# Altium schematic symbol library Capacitor.SchLib: 735 symbols (part 2 of 20)
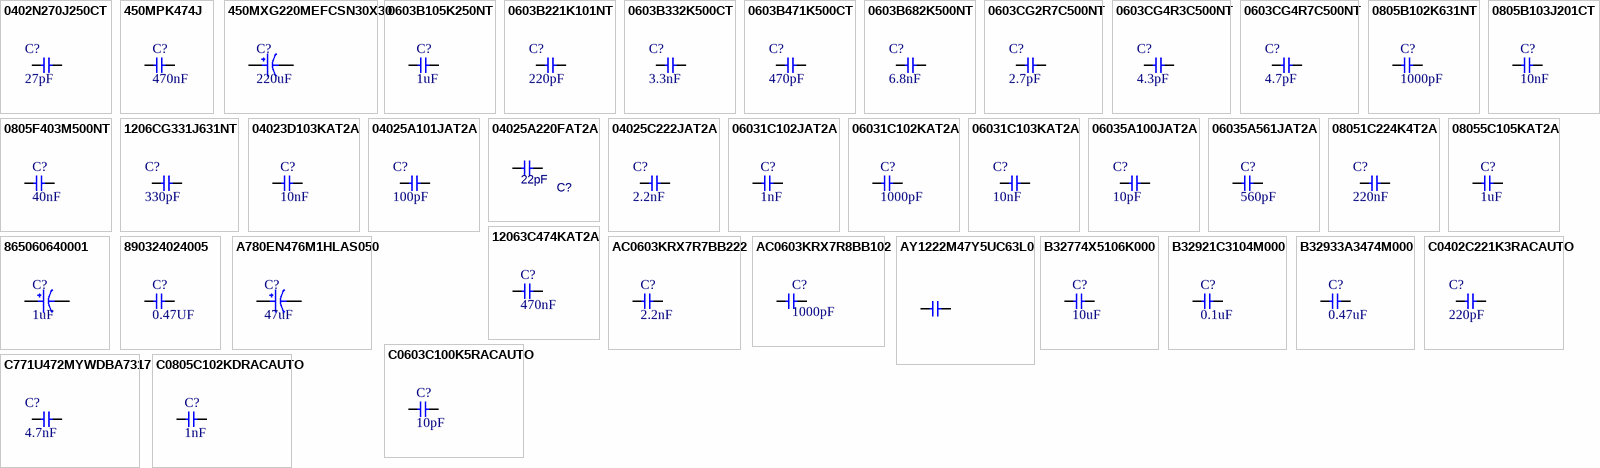
[diagram p19: symbols 0402N270J250CT to C0805C102KDRACAUTO]

## 04023D103KAT2A
designator C?, comment 10nF
CAP CER 10000PF 25V X5R 0402; Manufacturer: Kyocera AVX; Manufacturer Part Number: 04023D103KAT2A; Item Type: Capacitors; Supplier: Avnet; LCSC Part Number: C2167195; RoHS: Yes; Stock: 1210000; Pricing: 10000=0.03548, 20000=0.03795, 60000=0.03615 (USD); ComponentLink1URL: https://datasheet.ciiva.com/28673/759405-28673645.pdf?src-supplier=Element14; ComponentLink1Description: https://datasheet.ciiva.com/28673/759405-28673645.pdf?src-supplier=Element14; ComponentLink2URL: https://datasheet.ciiva.com/1123/1666675-1123349.pdf?src-supplier=Element14; ComponentLink2Description: https://datasheet.ciiva.com/1123/1666675-1123349.pdf?src-supplier=Element14; ComponentLink3URL: https://datasheet.ciiva.com/1123/1666675-1123350.pdf?src-supplier=Element14; ComponentLink3Description: https://datasheet.ciiva.com/1123/1666675-1123350.pdf?src-supplier=Element14; ComponentLink4URL: https://datasheet.ciiva.com/7709/1666675-7709529.pdf?src-supplier=Element14; ComponentLink4Description: https://datasheet.ciiva.com/7709/1666675-7709529.pdf?src-supplier=Element14; ComponentLink5URL: https://datasheet.ciiva.com/151/cx5r-151789.pdf?src-supplier=Digikey; ComponentLink5Description: https://datasheet.ciiva.com/151/cx5r-151789.pdf?src-supplier=Digikey; ComponentLink6URL: https://datasheet.ciiva.com/151/cx5r-151790.pdf?src-supplier=Digikey; ComponentLink6Description: https://datasheet.ciiva.com/151/cx5r-151790.pdf?src-supplier=Digikey; ComponentLink7URL: https://datasheet.ciiva.com/151/cx5r-151791.pdf?src-supplier=Digikey; ComponentLink7Description: https://datasheet.ciiva.com/151/cx5r-151791.pdf?src-supplier=Digikey; ComponentLink8URL: https://datasheet.ciiva.com/2987/cx5r-2987638.pdf?src-supplier=Avnet; ComponentLink8Description: https://datasheet.ciiva.com/2987/cx5r-2987638.pdf?src-supplier=Avnet; ComponentLink9URL: https://datasheet.ciiva.com/16395/cx5r-16395545.pdf?src-supplier=Future+Electronics; ComponentLink9Description: https://datasheet.ciiva.com/16395/cx5r-16395545.pdf?src-supplier=Future+Electronics
footprint Cap-0402
pins: 1, 2

## 04025A101JAT2A
designator C?, comment 100pF
CAP CER 100PF 50V C0G/NP0 0402; Manufacturer: Kyocera AVX; Manufacturer Part Number: 04025A101JAT2A; Tolerance: 5%; Dielectric: C0G; Insulation Resistance: 1GR; Temperature Coefficient: 30ppm/°C; Dissipation Factor: 2.5%; Item Type: Capacitor; Supplier 1: Avnet; RoHS: Yes; Category: Ceramic Capacitors; Stock 1: 3437500; Pricing 1: 10000=0.10788, 20000=0.10540, 40000=0.10292, 60000=0.10044, 80000=0.09796, 100000=0.09548, 1000000=0.09424 (USD); Mount: Surface Mount,PCB; Case/Package: 0402; Case Code (Metric): 1005; Case Code (Imperial): 0402; Contact Plating: Tin,Matte; Min Operating Temperature: -55°C; Max Operating Temperature: 125°C; Capacitance: 100pF; Voltage Rating (DC): 50V; Packaging: Tape and Reel; Voltage Rating: 50V; Package Quantity: 10000; Termination: SMD/SMT; Voltage: 50V; Series: -; Construction: Flat; Length: 1mm; Width: 0.004inch; Height: 0.56mm; Thickness: 0.013inch; Depth: 0.5mm; Radiation Hardening: No; Reach SVHC Compliant: Yes; Lead Free: Lead Free; RoHS Compliant: Yes; ComponentLink1URL: https://datasheet.ciiva.com/11786/0900766b80def0e2-11786618.pdf?src-supplier=RSComponents; ComponentLink1Description: https://datasheet.ciiva.com/11786/0900766b80def0e2-11786618.pdf?src-supplier=RSComponents; ComponentLink2URL: https://datasheet.ciiva.com/1123/493359-1123473.pdf?src-supplier=Element14; ComponentLink2Description: https://datasheet.ciiva.com/1123/493359-1123473.pdf?src-supplier=Element14; ComponentLink3URL: https://datasheet.ciiva.com/1123/493359-1123474.pdf?src-supplier=Element14; ComponentLink3Description: https://datasheet.ciiva.com/1123/493359-1123474.pdf?src-supplier=Element14; ComponentLink4URL: https://datasheet.ciiva.com/16332/ccog-16332501.pdf?src-supplier=Future+Electronics; ComponentLink4Description: https://datasheet.ciiva.com/16332/ccog-16332501.pdf?src-supplier=Future+Electronics; ComponentLink5URL: https://datasheet.ciiva.com/46392/759117-46392007.pdf?src-supplier=Element14; ComponentLink5Description: https://datasheet.ciiva.com/46392/759117-46392007.pdf?src-supplier=Element14; ComponentLink6URL: https://datasheet.ciiva.com/150/ccog-150473.pdf?src-supplier=Digi-Key; ComponentLink6Description: https://datasheet.ciiva.com/150/ccog-150473.pdf?src-supplier=Digi-Key; ComponentLink7URL: https://datasheet.ciiva.com/150/ccog-150474.pdf?src-supplier=Digi-Key; ComponentLink7Description: https://datasheet.ciiva.com/150/ccog-150474.pdf?src-supplier=Digi-Key; ComponentLink8URL: https://datasheet.ciiva.com/2987/ccog-2987642.pdf?src-supplier=Avnet; ComponentLink8Description: https://datasheet.ciiva.com/2987/ccog-2987642.pdf?src-supplier=Avnet; ComponentLink9URL: https://datasheet.ciiva.com/150/ccog-150475.pdf?src-supplier=Digi-Key; ComponentLink9Description: https://datasheet.ciiva.com/150/ccog-150475.pdf?src-supplier=Digi-Key; ComponentLink10URL: https://datasheet.ciiva.com/8083/ccog-8083054.pdf?src-supplier=Avnet; ComponentLink10Description: https://datasheet.ciiva.com/8083/ccog-8083054.pdf?src-supplier=Avnet; ComponentLink11URL: https://datasheet.ciiva.com/5413/ccog-5413647.pdf?src-supplier=Mouser; ComponentLink11Description: https://datasheet.ciiva.com/5413/ccog-5413647.pdf?src-supplier=Mouser; Supplier Part Number 1: 04025A101JAT2A; LCSC Part Number: C597014
footprint Cap-0402
pins: 1, 2

## 04025A220FAT2A
designator C?, comment 22pF
CAP CER 22PF 50V C0G/NP0 0402; Manufacturer: Kyocera AVX; Manufacturer Part Number: 04025A220FAT2A; Tolerance: 1%; Dielectric: C0G; Item Type: Capacitor; ComponentLink1URL: http://psearch.murata.com/capacitor/product/GCM219R71C105KA37%23.pdf; ComponentLink1Description: http://psearch.murata.com/capacitor/product/GCM219R71C105KA37%23.pdf; ComponentLink2URL: http://search.murata.co.jp/Ceramy/image/img/A01X/partnumbering_e_02.pdf; ComponentLink2Description: http://search.murata.co.jp/Ceramy/image/img/A01X/partnumbering_e_02.pdf; ComponentLink3URL: http://psearch.en.murata.com/capacitor/product/GCM219R71C105KA37%23.pdf; ComponentLink3Description: http://psearch.en.murata.com/capacitor/product/GCM219R71C105KA37%23.pdf; ComponentLink4URL: http://uk.rs-online.com/webdocs/0ef9/0900766b80ef92d0.pdf; ComponentLink4Description: http://uk.rs-online.com/webdocs/0ef9/0900766b80ef92d0.pdf; ComponentLink5URL: http://www.yageo.com/documents/recent/UPY-GP_NP0_16V-to-50V_16.pdf; ComponentLink5Description: http://www.yageo.com/documents/recent/UPY-GP_NP0_16V-to-50V_16.pdf; ComponentLink6URL: http://www.farnell.com/datasheets/1443161.pdf; ComponentLink6Description: http://www.farnell.com/datasheets/1443161.pdf; ComponentLink7URL: http://www.yageo.com/documents/recent/UPY-GP_NP0_16V-to-50V_8.pdf; ComponentLink7Description: http://www.yageo.com/documents/recent/UPY-GP_NP0_16V-to-50V_8.pdf; ComponentLink8URL: http://www.farnell.com/datasheets/1132289.pdf; ComponentLink8Description: http://www.farnell.com/datasheets/1132289.pdf; ComponentLink9URL: http://www.mouser.com/ds/2/447/Yageo_UPY-GP_NP0_16V-to-50V_9-358835.pdf; ComponentLink9Description: http://www.mouser.com/ds/2/447/Yageo_UPY-GP_NP0_16V-to-50V_9-358835.pdf; ComponentLink10URL: https://www.verical.com/server-webapp/html/getDatasheet?partID=370074; ComponentLink10Description: https://www.verical.com/server-webapp/html/getDatasheet?partID=370074; ComponentLink11URL: http://catalogs.avx.com/SurfaceMount.pdf; ComponentLink11Description: http://catalogs.avx.com/SurfaceMount.pdf; ComponentLink12URL: http://www.avxcorp.com/docs/Catalogs/ccog.pdf; ComponentLink12Description: http://www.avxcorp.com/docs/Catalogs/ccog.pdf; ComponentLink13URL: http://www.mouser.com/ds/2/40/C0GNP0-Dielectric-951274.pdf; ComponentLink13Description: http://www.mouser.com/ds/2/40/C0GNP0-Dielectric-951274.pdf; Supplier 1: Digi-Key; Stock 1: 100000; Pricing 1: 1=0.67, 10=0.472, 100=0.3105, 500=0.23, 1000=0.1955, 2500=0.184, 5000=0.1725 (USD); Mount: Surface Mount; Case/Package: 0402; Case Code (Metric): 1005; Case Code (Imperial): 0402; Contact Plating: Matte,Tin; Min Operating Temperature: -55°C; Max Operating Temperature: 125°C; Capacitance: 22pF; Packaging: Tape and Reel; Voltage Rating (DC): 50V; Voltage Rating: 50V; Package Quantity: 1; Termination: SMD/SMT; Length: 1mm; Height: 0.56mm; Depth: 0.5mm; Width: 0.02inch; Thickness: 0.022inch; Radiation Hardening: No; REACH SVHC: Unknown; Lead Free: Lead Free; Supplier Part Number 1: 478-5765-1-ND; LCSC Part Number: C597022
footprint Cap-0402
pins: 1, 2

## 04025C222JAT2A
designator C?, comment 2.2nF
CAP CER 2.2nF 50V X7R ±5% 0402 MLCC - SMD/SMT ROHS; Manufacturer: Kyocera AVX; Manufacturer Part Number: 04025C222JAT2A; Item Type: Capacitor; Package: 0402; LCSC Part Number: C597041; ComponentLink1Description: LCSC; ComponentLink1URL: https://www.lcsc.com/product-detail/Multilayer-Ceramic-Capacitors-MLCC-SMD-SMT_Kyocera-AVX-04025C222JAT2A_C597041.html
footprint Cap-0402
pins: 1, 2

## 06031C102JAT2A
designator C?, comment 1nF
CAP CER 1000PF 100V X7R 0603; Manufacturer: Kyocera AVX; Manufacturer Part Number: 06031C102JAT2A; Item Type: Capacitor; Material: 4241ConductorMaterial; Supplier: Future Electronics; LCSC Part Number: C2179225; RoHS: Yes; Stock: 32000; Pricing: 4000=0.0243, 12000=0.0234, 20000=0.023, 40000=0.0225, 80000=0.0216 (USD); Lead Free: 5697LeadFree; ComponentLink1URL: https://datasheet.ciiva.com/27056/2011951-27056177.pdf?src-supplier=Jameco; ComponentLink1Description: https://datasheet.ciiva.com/27056/2011951-27056177.pdf?src-supplier=Jameco; ComponentLink2URL: https://datasheet.ciiva.com/2987/cx7r-2987732.pdf?src-supplier=Avnet; ComponentLink2Description: https://datasheet.ciiva.com/2987/cx7r-2987732.pdf?src-supplier=Avnet; ComponentLink3URL: https://datasheet.ciiva.com/151/cx7r-151600.pdf?src-supplier=Digikey; ComponentLink3Description: https://datasheet.ciiva.com/151/cx7r-151600.pdf?src-supplier=Digikey; ComponentLink4URL: https://datasheet.ciiva.com/151/cx7r-151601.pdf?src-supplier=Digikey; ComponentLink4Description: https://datasheet.ciiva.com/151/cx7r-151601.pdf?src-supplier=Digikey; ComponentLink5URL: https://datasheet.ciiva.com/151/cx7r-151602.pdf?src-supplier=Digikey; ComponentLink5Description: https://datasheet.ciiva.com/151/cx7r-151602.pdf?src-supplier=Digikey; ComponentLink6URL: https://datasheet.ciiva.com/1124/1679506-1124194.pdf?src-supplier=Element14; ComponentLink6Description: https://datasheet.ciiva.com/1124/1679506-1124194.pdf?src-supplier=Element14; ComponentLink7URL: https://datasheet.ciiva.com/1124/1679506-1124195.pdf?src-supplier=Element14; ComponentLink7Description: https://datasheet.ciiva.com/1124/1679506-1124195.pdf?src-supplier=Element14; ComponentLink8URL: https://datasheet.ciiva.com/7855/1679506-7855032.pdf?src-supplier=Element14; ComponentLink8Description: https://datasheet.ciiva.com/7855/1679506-7855032.pdf?src-supplier=Element14; ComponentLink9URL: https://datasheet.ciiva.com/16286/cx7r-16286463.pdf?src-supplier=Future+Electronics; ComponentLink9Description: https://datasheet.ciiva.com/16286/cx7r-16286463.pdf?src-supplier=Future+Electronics
footprint Cap-0603
pins: 1, 2

## 06031C102KAT2A
designator C?, comment 1000pF
CAP CER 1000PF 100V X7R 0603; Manufacturer: Kyocera AVX; Manufacturer Part Number: 06031C102KAT2A; Item Type: Capacitor; Supplier: Avnet; LCSC Part Number: C2167292; RoHS: Yes; Stock: 656000; Pricing: 4000=0.0086, 8000=0.0084, 16000=0.0082, 24000=0.008, 32000=0.0079 (USD); Lead Free: 5697LeadFree; ComponentLink1URL: https://datasheet.ciiva.com/5422/cx7r-218113-5422905.pdf?src-supplier=Mouser; ComponentLink1Description: https://datasheet.ciiva.com/5422/cx7r-218113-5422905.pdf?src-supplier=Mouser; ComponentLink2URL: https://datasheet.ciiva.com/11499/cx7r-11499669.pdf?src-supplier=Avnet; ComponentLink2Description: https://datasheet.ciiva.com/11499/cx7r-11499669.pdf?src-supplier=Avnet; ComponentLink3URL: https://datasheet.ciiva.com/2987/cx7r-2987733.pdf?src-supplier=Avnet; ComponentLink3Description: https://datasheet.ciiva.com/2987/cx7r-2987733.pdf?src-supplier=Avnet; ComponentLink4URL: https://datasheet.ciiva.com/150/cx7r-150395.pdf?src-supplier=Digikey; ComponentLink4Description: https://datasheet.ciiva.com/150/cx7r-150395.pdf?src-supplier=Digikey; ComponentLink5URL: https://datasheet.ciiva.com/150/cx7r-150396.pdf?src-supplier=Digikey; ComponentLink5Description: https://datasheet.ciiva.com/150/cx7r-150396.pdf?src-supplier=Digikey; ComponentLink6URL: https://datasheet.ciiva.com/150/cx7r-150397.pdf?src-supplier=Digikey; ComponentLink6Description: https://datasheet.ciiva.com/150/cx7r-150397.pdf?src-supplier=Digikey; ComponentLink7URL: https://datasheet.ciiva.com/1124/1679506-1124198.pdf?src-supplier=Element14; ComponentLink7Description: https://datasheet.ciiva.com/1124/1679506-1124198.pdf?src-supplier=Element14; ComponentLink8URL: https://datasheet.ciiva.com/22693/1679506-22693579.pdf?src-supplier=Element14; ComponentLink8Description: https://datasheet.ciiva.com/22693/1679506-22693579.pdf?src-supplier=Element14; ComponentLink9URL: https://datasheet.ciiva.com/7855/1679506-7855033.pdf?src-supplier=Element14; ComponentLink9Description: https://datasheet.ciiva.com/7855/1679506-7855033.pdf?src-supplier=Element14; ComponentLink10URL: https://datasheet.ciiva.com/7855/84526-7855189.pdf?src-supplier=Element14; ComponentLink10Description: https://datasheet.ciiva.com/7855/84526-7855189.pdf?src-supplier=Element14; ComponentLink11URL: https://datasheet.ciiva.com/16289/cx7r-16289400.pdf?src-supplier=Future+Electronics; ComponentLink11Description: https://datasheet.ciiva.com/16289/cx7r-16289400.pdf?src-supplier=Future+Electronics; ComponentLink12URL: https://datasheet.ciiva.com/14594/70001075-14594623.pdf?src-supplier=Allied+Electronics; ComponentLink12Description: https://datasheet.ciiva.com/14594/70001075-14594623.pdf?src-supplier=Allied+Electronics; ComponentLink13URL: https://datasheet.ciiva.com/14600/70001075-14600988.pdf?src-supplier=Allied+Electronics; ComponentLink13Description: https://datasheet.ciiva.com/14600/70001075-14600988.pdf?src-supplier=Allied+Electronics
footprint Cap-0603
pins: 1, 2

## 06031C103KAT2A
designator C?, comment 10nF
CAP CER 10000PF 100V X7R 0603; Manufacturer: Kyocera AVX; Manufacturer Part Number: 06031C103KAT2A; Item Type: Capacitors; Material: 4241ConductorMaterial; Tolerance: 10%; Insulation Resistance: 100GR; Dissipation Factor: 2.5%; Supplier: Avnet; LCSC Part Number: C2167322; RoHS: Yes; Stock: 512000; Pricing: 4000=0.05033 (USD); Mounting Technology: Surface Mount,PCB; Case/Package: 0603; Pins: 2; Case Code (Metric): 1608; Case Code (Imperial): 0603; Min Operating Temperature: -55°C; Max Operating Temperature: 125°C; Value: 10nF; Dielectric: X7R; Packaging: Tape and Reel; Voltage Rating (DC): 100V; Voltage: 100V; Voltage Rating: 100V; Package Quantity: 4000; Termination: SMD/SMT; Series: -; Construction: Flat; Voltage Rating (AC): 100V; Length: 1.6mm; Width: 0.006inch; Height: 0.9mm; Depth: 0.81mm; Thickness: 0.034inch; Reach SVHC Compliant: No; Lead Free: Lead Free; RoHS Compliant: Yes; ComponentLink1URL: https://datasheet.ciiva.com/11788/0900766b80dc2409-11788544.pdf?src-supplier=Rs; ComponentLink1Description: https://datasheet.ciiva.com/11788/0900766b80dc2409-11788544.pdf?src-supplier=Rs; ComponentLink2URL: https://datasheet.ciiva.com/1124/1679506-1124248.pdf?src-supplier=Element14; ComponentLink2Description: https://datasheet.ciiva.com/1124/1679506-1124248.pdf?src-supplier=Element14; ComponentLink3URL: https://datasheet.ciiva.com/152/cx7r-152476.pdf?src-supplier=Digikey; ComponentLink3Description: https://datasheet.ciiva.com/152/cx7r-152476.pdf?src-supplier=Digikey; ComponentLink4URL: https://datasheet.ciiva.com/2987/cx7r-2987736.pdf?src-supplier=Avnet; ComponentLink4Description: https://datasheet.ciiva.com/2987/cx7r-2987736.pdf?src-supplier=Avnet; ComponentLink5URL: https://datasheet.ciiva.com/1124/1679506-1124247.pdf?src-supplier=Element14; ComponentLink5Description: https://datasheet.ciiva.com/1124/1679506-1124247.pdf?src-supplier=Element14; ComponentLink6URL: https://datasheet.ciiva.com/7855/1679506-7855035.pdf?src-supplier=Element14; ComponentLink6Description: https://datasheet.ciiva.com/7855/1679506-7855035.pdf?src-supplier=Element14; ComponentLink7URL: https://datasheet.ciiva.com/152/cx7r-152475.pdf?src-supplier=Digikey; ComponentLink7Description: https://datasheet.ciiva.com/152/cx7r-152475.pdf?src-supplier=Digikey; ComponentLink8URL: https://datasheet.ciiva.com/152/cx7r-152477.pdf?src-supplier=Digikey; ComponentLink8Description: https://datasheet.ciiva.com/152/cx7r-152477.pdf?src-supplier=Digikey; ComponentLink9URL: https://datasheet.ciiva.com/5411/cx7r-5411278.pdf?src-supplier=Mouser; ComponentLink9Description: https://datasheet.ciiva.com/5411/cx7r-5411278.pdf?src-supplier=Mouser; ComponentLink10URL: https://datasheet.ciiva.com/14590/70001075-14590198.pdf?src-supplier=Allied+Electronics; ComponentLink10Description: https://datasheet.ciiva.com/14590/70001075-14590198.pdf?src-supplier=Allied+Electronics
footprint Cap-0603
pins: 1, 2

## 06035A100JAT2A
designator C?, comment 10pF
CAP CER 10PF 50V C0G/NP0 0603; Manufacturer: Kyocera AVX; Manufacturer Part Number: 06035A100JAT2A/4K; Tolerance: 5%; Dielectric: C0G; Temperature Coefficient: 30ppm/°C; Insulation Resistance: 100GR; Item Type: Capacitor; Supplier 1: Digi-Key; Stock 1: 196463; Pricing 1: 1=0.1, 10=0.05, 50=0.0272, 100=0.0222, 500=0.01586, 1000=0.01246 (USD); Mount: Surface Mount; Case/Package: 0603; Number of Pins: 2; Min Operating Temperature: -55°C; Max Operating Temperature: 125°C; Capacitance: 10pF; Packaging: Cut Tape; Voltage Rating (DC): 50V; Voltage: 50V; Length: 1.6mm; Width: 810um; Height: 0.9mm; Depth: 0.81mm; Thickness: 864um; REACH SVHC: No SVHC; Lead Free: Lead Free; Supplier Part Number 1: 478-1163-1-ND; LCSC Part Number: C79547
footprint Cap-0603
pins: 1, 2

## 06035A561JAT2A
designator C?, comment 560pF
CAP CER 560PF 50V C0G/NP0 0603; Manufacturer: Kyocera AVX; Manufacturer Part Number: 06035A561JAT2A; Item Type: Capacitor; Supplier: Future Electronics; LCSC Part Number: C597173; RoHS: Yes; Stock: 180000; Pricing: 4000=0.0172, 16000=0.0165, 40000=0.0091, 60000=0.0158, 100000=0.0088, 120000=0.0155, 160000=0.0083, 300000=0.0148 (USD); ComponentLink1URL: https://datasheet.ciiva.com/27051/1032160-27051276.pdf?src-supplier=Jameco; ComponentLink1Description: https://datasheet.ciiva.com/27051/1032160-27051276.pdf?src-supplier=Jameco; ComponentLink2URL: https://datasheet.ciiva.com/16286/ccog-16286446.pdf?src-supplier=Future+Electronics; ComponentLink2Description: https://datasheet.ciiva.com/16286/ccog-16286446.pdf?src-supplier=Future+Electronics; ComponentLink3URL: https://datasheet.ciiva.com/150/ccog-150647.pdf?src-supplier=Digikey; ComponentLink3Description: https://datasheet.ciiva.com/150/ccog-150647.pdf?src-supplier=Digikey; ComponentLink4URL: https://datasheet.ciiva.com/150/ccog-150648.pdf?src-supplier=Digikey; ComponentLink4Description: https://datasheet.ciiva.com/150/ccog-150648.pdf?src-supplier=Digikey; ComponentLink5URL: https://datasheet.ciiva.com/150/ccog-150649.pdf?src-supplier=Digikey; ComponentLink5Description: https://datasheet.ciiva.com/150/ccog-150649.pdf?src-supplier=Digikey; ComponentLink6URL: https://datasheet.ciiva.com/2987/ccog-2987809.pdf?src-supplier=Avnet; ComponentLink6Description: https://datasheet.ciiva.com/2987/ccog-2987809.pdf?src-supplier=Avnet; ComponentLink7URL: https://datasheet.ciiva.com/2987/ccog-2987810.pdf?src-supplier=Avnet; ComponentLink7Description: https://datasheet.ciiva.com/2987/ccog-2987810.pdf?src-supplier=Avnet; ComponentLink8URL: https://datasheet.ciiva.com/5423/ccog-5423589.pdf?src-supplier=Mouser; ComponentLink8Description: https://datasheet.ciiva.com/5423/ccog-5423589.pdf?src-supplier=Mouser; ComponentLink9URL: https://datasheet.ciiva.com/14598/70001039-14598549.pdf?src-supplier=Allied+Electronics; ComponentLink9Description: https://datasheet.ciiva.com/14598/70001039-14598549.pdf?src-supplier=Allied+Electronics; ComponentLink10URL: https://datasheet.ciiva.com/1124/425357-1124836.pdf?src-supplier=Element14; ComponentLink10Description: https://datasheet.ciiva.com/1124/425357-1124836.pdf?src-supplier=Element14; ComponentLink11URL: https://datasheet.ciiva.com/1124/425357-1124837.pdf?src-supplier=Element14; ComponentLink11Description: https://datasheet.ciiva.com/1124/425357-1124837.pdf?src-supplier=Element14
footprint Cap-0603
pins: 1, 2

## 08051C224K4T2A
designator C?, comment 220nF
CAP CER 0.22UF 100V X7R 0805; Manufacturer: Kyocera AVX; Manufacturer Part Number: 08051C224K4T2A; Tolerance: 10%; Item Type: Capacitor; Supplier 1: Digi-Key; RoHS: Yes; Category: Ceramic Capacitors; Stock 1: 151; Pricing 1: 1=0.27000, 10=0.18500, 50=0.12320, 100=0.10470, 500=0.07392, 1000=0.06468 (USD); Mount: Surface Mount; Case/Package: 0805; Contact Plating: Tin; Min Operating Temperature: -55°C; Max Operating Temperature: 125°C; Termination: Wraparound; Capacitance: 220nF; Dielectric: X7R; Voltage Rating (DC): 100V; Length: 2.01mm; RoHS Compliant: Yes; ComponentLink1URL: http://datasheets.avx.com/AutoMLCC.pdf?src-supplier=Avnet+Asia; ComponentLink1Description: http://datasheets.avx.com/AutoMLCC.pdf?src-supplier=Avnet+Asia; Supplier Part Number 1: 478-13049-1-ND; LCSC Part Number: C2176107
footprint Cap-0805 (SMD 0805)
pins: 1, 2

## 08055C105KAT2A
designator C?, comment 1uF
CAP CER 1UF 50V X7R 0805; Manufacturer: Kyocera AVX; Manufacturer Part Number: 08055C105KAT2A; Item Type: Capacitors; Material: Ceramic; Tolerance: 10%; Supplier: Rs; LCSC Part Number: C2167382; RoHS: Yes; Stock: 6530; Pricing: 10=1.518, 50=1.406, 100=1.309, 250=1.137, 500=0.98 (DKK); Mounting Technology: Surface Mount; Case/Package: 0805; Case Code (Metric): 2012; Case Code (Imperial): 0805; Min Operating Temperature: -55°C; Max Operating Temperature: 125°C; Value: 1uF; Dielectric: X7R; Termination: SMD/SMT; Voltage: 50V; Packaging: Tape and Reel; Voltage Rating: 50V; Package Quantity: 1; Series: -; Length: 2.01mm; Width: 0.049inch; Depth: 1.25mm; Thickness: 0.037inch; Reach SVHC Compliant: No; Lead Free: Lead Free; RoHS Compliant: Yes; ComponentLink1URL: https://datasheet.ciiva.com/25613/0900766b810a29b7-25613127.pdf?src-supplier=Rs; ComponentLink1Description: https://datasheet.ciiva.com/25613/0900766b810a29b7-25613127.pdf?src-supplier=Rs; ComponentLink2URL: https://datasheet.ciiva.com/6268/cx7r-6268826.pdf?src-supplier=Digikey; ComponentLink2Description: https://datasheet.ciiva.com/6268/cx7r-6268826.pdf?src-supplier=Digikey; ComponentLink3URL: https://datasheet.ciiva.com/7812/cx7r-7812085.pdf?src-supplier=Element14; ComponentLink3Description: https://datasheet.ciiva.com/7812/cx7r-7812085.pdf?src-supplier=Element14; ComponentLink4URL: https://datasheet.ciiva.com/22706/1679506-22706999.pdf?src-supplier=Element14; ComponentLink4Description: https://datasheet.ciiva.com/22706/1679506-22706999.pdf?src-supplier=Element14; ComponentLink5URL: https://datasheet.ciiva.com/46385/1818074-46385893.pdf?src-supplier=Element14; ComponentLink5Description: https://datasheet.ciiva.com/46385/1818074-46385893.pdf?src-supplier=Element14; ComponentLink6URL: https://datasheet.ciiva.com/14887/cx7r-14887080.pdf?src-supplier=Digikey; ComponentLink6Description: https://datasheet.ciiva.com/14887/cx7r-14887080.pdf?src-supplier=Digikey; ComponentLink7URL: https://datasheet.ciiva.com/14887/cx7r-14887081.pdf?src-supplier=Digikey; ComponentLink7Description: https://datasheet.ciiva.com/14887/cx7r-14887081.pdf?src-supplier=Digikey
footprint Cap-0805 (SMD 0805)
pins: 1, 2

## 12063C474KAT2A
designator C?, comment 470nF
CAP CER 0.47UF 25V X7R 1206; Manufacturer: Kyocera AVX; Manufacturer Part Number: 12063C474KAT2A; Item Type: Capacitor; Supplier: Future Electronics; LCSC Part Number: C5128353; RoHS: Yes; Stock: 38000; Pricing: 2000=0.0614, 6000=0.0591, 10000=0.0566, 20000=0.0567, 40000=0.0554, 80000=0.053 (USD); ComponentLink1URL: https://datasheet.ciiva.com/11788/0900766b80dc2409-11788602.pdf?src-supplier=Rs; ComponentLink1Description: https://datasheet.ciiva.com/11788/0900766b80dc2409-11788602.pdf?src-supplier=Rs; ComponentLink2URL: https://datasheet.ciiva.com/19476/2014158-19476160.pdf?src-supplier=Jameco; ComponentLink2Description: https://datasheet.ciiva.com/19476/2014158-19476160.pdf?src-supplier=Jameco; ComponentLink3URL: https://datasheet.ciiva.com/14601/70001075-14601957.pdf?src-supplier=Allied+Electronics; ComponentLink3Description: https://datasheet.ciiva.com/14601/70001075-14601957.pdf?src-supplier=Allied+Electronics; ComponentLink4URL: https://datasheet.ciiva.com/28546/683218-28546839.pdf?src-supplier=Element14; ComponentLink4Description: https://datasheet.ciiva.com/28546/683218-28546839.pdf?src-supplier=Element14; ComponentLink5URL: https://datasheet.ciiva.com/7833/84526-7833365.pdf?src-supplier=Element14; ComponentLink5Description: https://datasheet.ciiva.com/7833/84526-7833365.pdf?src-supplier=Element14; ComponentLink6URL: https://datasheet.ciiva.com/16291/cx7r-16291039.pdf?src-supplier=Future+Electronics; ComponentLink6Description: https://datasheet.ciiva.com/16291/cx7r-16291039.pdf?src-supplier=Future+Electronics; ComponentLink7URL: https://datasheet.ciiva.com/152/cx7r-152592.pdf?src-supplier=Digikey; ComponentLink7Description: https://datasheet.ciiva.com/152/cx7r-152592.pdf?src-supplier=Digikey; ComponentLink8URL: https://datasheet.ciiva.com/152/cx7r-152593.pdf?src-supplier=Digikey; ComponentLink8Description: https://datasheet.ciiva.com/152/cx7r-152593.pdf?src-supplier=Digikey; ComponentLink9URL: https://datasheet.ciiva.com/152/cx7r-152594.pdf?src-supplier=Digikey; ComponentLink9Description: https://datasheet.ciiva.com/152/cx7r-152594.pdf?src-supplier=Digikey
footprint Cap-1206 (SMD 1206)
pins: 1, 2

## 865060640001
designator C?, comment 1uF
CAP ALUM 1UF 20% 50V SMD; Manufacturer: Wurth Electronics; Manufacturer Part Number: 865060640001; Item Type: Capacitor; Leakage Current: 3uA; Insulation Resistance: 16.6667MR; Supplier: Digikey; Supplier Part Number: 732-8541-1-ND; RoHS: Yes; Stock: 18299; Pricing: 1=0.17, 50=0.141, 100=0.123, 250=0.109, 500=0.095, 1000=0.091 (USD); Length: 5.5mm; ComponentLink1URL: http://www.farnell.com/datasheets/1880069.pdf?src-supplier=Farnell; ComponentLink1Description: http://www.farnell.com/datasheets/1880069.pdf?src-supplier=Farnell; ComponentLink2URL: http://www.farnell.com/datasheets/1880069.pdf?src-supplier=Newark; ComponentLink2Description: http://www.farnell.com/datasheets/1880069.pdf?src-supplier=Newark; ComponentLink3URL: https://katalog.we-online.de/pbs/datasheet/865060640001.pdf?src-supplier=Digikey; ComponentLink3Description: https://katalog.we-online.de/pbs/datasheet/865060640001.pdf?src-supplier=Digikey; ComponentLink4URL: http://katalog.we-online.de/pbs/datasheet/865060640001.pdf?src-supplier=Digikey; ComponentLink4Description: http://katalog.we-online.de/pbs/datasheet/865060640001.pdf?src-supplier=Digikey; ComponentLink5URL: http://www.farnell.com/datasheets/1880069.pdf?src-supplier=Element14; ComponentLink5Description: http://www.farnell.com/datasheets/1880069.pdf?src-supplier=Element14
footprint 865060640001
pins: 1, 2

## 890324024005
designator C?, comment 0.47UF
CAP FILM 0.47UF 10% 275VAC RAD; Manufacturer: Wurth Electronics; Manufacturer Part Number: 890324024005; Item Type: Capacitor; Supplier: Digikey; Supplier Part Number: 732-5890-ND; RoHS: Yes; Stock: 13537; Pricing: 1=0.75, 50=0.645, 100=0.574, 250=0.501, 500=0.454, 1000=0.418 (USD); ComponentLink1URL: http://www.farnell.com/datasheets/1867975.pdf?src-supplier=Farnell; ComponentLink1Description: http://www.farnell.com/datasheets/1867975.pdf?src-supplier=Farnell; ComponentLink2URL: http://www.farnell.com/datasheets/1867975.pdf?src-supplier=Element14; ComponentLink2Description: http://www.farnell.com/datasheets/1867975.pdf?src-supplier=Element14; ComponentLink3URL: https://katalog.we-online.de/pbs/datasheet/890324024005.pdf?src-supplier=Digikey; ComponentLink3Description: https://katalog.we-online.de/pbs/datasheet/890324024005.pdf?src-supplier=Digikey; ComponentLink4URL: http://www.farnell.com/datasheets/1867975.pdf?src-supplier=Newark; ComponentLink4Description: http://www.farnell.com/datasheets/1867975.pdf?src-supplier=Newark
footprint 890324024005
pins: 1, 2

## A780EN476M1HLAS050
designator C?, comment 47uF
CAP ALUM HYB 47UF 20% 50V SMD; Manufacturer: KEMET; Manufacturer Part Number: A780EN476M1HLAS050; Item Type: Capacitor; Supplier: Mouser; Supplier Part Number: 80-A780EN476M1HLAS50; RoHS: No; Category: Polymer Capacitors; Stock: 5998; Pricing: 1=0.67, 10=0.397, 50=0.397, 100=0.323, 1000=0.212, 10000=0.188 (USD)
footprint A780EN476M1HLAS050
pins: 1, 2

## AC0603KRX7R7BB222
designator C?, comment 2.2nF
CAP CER 2200PF 16V X7R 0603; Manufacturer: Yageo; Manufacturer Part Number: AC0603KRX7R7BB222; Item Type: Capacitor; Tolerance: 10%; Supplier: Digikey; LCSC Part Number: C726555; RoHS: Yes; Stock: 423; Pricing: 1=0.11, 10=0.077, 50=0.0444, 100=0.0345, 500=0.02594, 1000=0.02039 (USD); Mounting Technology: Surface Mount; Case/Package: 0603; Case Code (Imperial): 0603; Case Code (Metric): 1608; Min Operating Temperature: -55°C; Max Operating Temperature: 125°C; Packaging: Cut Tape; Value: 2.2nF; Voltage Rating: 16V; Series: AC; Ratings: AEC-Q200; RoHS Compliant: Yes; ComponentLink1URL: http://www.yageo.com/NewPortal/_en/search/productDocs.jsp?YageoPartNumber=AC0603KRX7R7BB222&src-supplier=Digikey; ComponentLink1Description: http://www.yageo.com/NewPortal/_en/search/productDocs.jsp?YageoPartNumber=AC0603KRX7R7BB222&src-supplier=Digikey
footprint Cap-0603
pins: 1, 2

## AC0603KRX7R8BB102
designator C?, comment 1000pF
CAP CER 1000PF 25V X7R 0603; Item Type: Capacitor; Value: 1nF; Tolerance: 10%; LCSC Part Number: C726558; ComponentLink1Description: LCSC; Supplier: Digi-Key; Supplier Part Number: 311-3110-1-ND; RoHS: Yes; Category: Ceramic Capacitors; Stock: 13949; Pricing: 1=0.1, 10=0.042, 50=0.024, 100=0.0186, 500=0.014, 1000=0.011 (USD); Mounting Technology: Surface Mount; Case/Package: 0603; Case Code (Imperial): 0603; Case Code (Metric): 1608; Min Operating Temperature: -55°C; Max Operating Temperature: 125°C; Packaging: Cut Tape; Voltage Rating: 25V; Series: AC; Ratings: AEC-Q200; RoHS Compliant: Yes; ComponentLink2URL: http://www.yageo.com/NewPortal/_en/search/productDocs.jsp?YageoPartNumber=AC0603KRX7R8BB102&src-supplier=Digi-Key; ComponentLink2Description: http://www.yageo.com/NewPortal/_en/search/productDocs.jsp?YageoPartNumber=AC0603KRX7R8BB102&src-supplier=Digi-Key
footprint Cap-0603
pins: 1, 2

## AY1222M47Y5UC63L0
designator C?, comment 2.2nF
CAP CER 2200PF 760VAC Y5U RADIAL; Item Type: Capacitor; LCSC Part Number: C1620433; ComponentLink1Description: LCSC; Supplier: Mouser; Supplier Part Number: 72-AY1222M47Y5UC63L0; RoHS: No; Category: Ceramic Capacitors; Stock: 23960; Pricing: 1=0.72, 10=0.395, 50=0.395, 100=0.326, 1000=0.216, 10000=0.19 (USD); ComponentLink2URL: http://www.farnell.com/datasheets/2719986.pdf?src-supplier=Farnell; ComponentLink2Description: http://www.farnell.com/datasheets/2719986.pdf?src-supplier=Farnell
footprint AY1222M47Y5UC63L0
pins: 1, 2

## B32774X5106K000
designator C?, comment 10uF
FILM CAP MKP DC FILTERING - 600V; Manufacturer: TDK; Manufacturer Part Number: B32774X5106K000; Item Type: Capacitor; Supplier: Digikey; Supplier Part Number: 495-B32774X5106K000-ND; RoHS: No; Pricing: 1=4.3, 10=2.896, 50=2.3266, 224=1.97978, 672=1.80198, 1120=1.77575 (USD)
footprint B32774X5106K000
pins: 1, 2

## B32921C3104M000
designator C?, comment 0.1uF
CAP FILM 0.1UF 20% 630VDC RADIAL; Manufacturer: TDK EPCOS; Manufacturer Part Number: B32921C3104M000; Item Type: Film Capacitors; Dielectric Material: Polypropylene; Value: 100nF; Voltage: 630V; Dielectric: PP; Voltage Rating (AC): 305V; Insulation Resistance: 100R; Dissipation Factor: 1%; Lead Diameter: 0.6mm; Lead Length: 6mm; Ratings: X2; Supplier: Rs; LCSC Part Number: C361368; RoHS: Yes; Stock: 6670; Pricing: 100=1.997, 250=1.855, 500=1.75, 1000=1.571 (DKK); Mounting Technology: Through Hole; Case/Package: Radial; Pins: 2NUMBER; Min Operating Temperature: -40°C; Max Operating Temperature: 110°C; Tolerance: 20%; Termination: PC Pins; Series: B32921; Voltage Rating (DC): 630V; Length: 13mm; Height: 12mm; Lead Pitch: 10mm; Depth: 6mm; Reach SVHC Compliant: No; RoHS Compliant: Yes; ComponentLink1URL: https://datasheet.ciiva.com/48779/1833206-48779695.pdf?src-supplier=Element14; ComponentLink1Description: https://datasheet.ciiva.com/48779/1833206-48779695.pdf?src-supplier=Element14
footprint B32921C3104M000
pins: 1, 2

## B32933A3474M000
designator C?, comment 0.47uF
CAP FILM 0.47UF 20% 305VAC RAD; Manufacturer: TDK EPCOS; Manufacturer Part Number: B32933A3474M000; Item Type: Capacitors; Dielectric Material: Polyester; Value: 470nF; Ratings: AEC-Q200,X2; Supplier: Digikey; Supplier Part Number: 495-75595-ND; RoHS: Yes; Stock: 1785; Pricing: 1=1.25, 10=0.938, 50=0.8558, 100=0.701, 510=0.55953, 1020=0.4937, 2550=0.46078, 5100=0.45713 (USD); Case/Package: Radial; Series: B32933; Termination: PC Pins; RoHS Compliant: Yes; ComponentLink1URL: https://en.tdk.eu/inf/20/20/ds/MKT_B32932_936.pdf?src-supplier=Digikey; ComponentLink1Description: https://en.tdk.eu/inf/20/20/ds/MKT_B32932_936.pdf?src-supplier=Digikey
footprint B32933A3474M000
pins: 1, 2

## C0402C221K3RACAUTO
designator C?, comment 220pF
Cap Cer 220PF 25V X7R 0402; Manufacturer: KEMET; Manufacturer Part Number: C0402C221K3RACAUTO; Supplier: Mouser; Supplier Part Number: 80-C0402C221K3RAUTO; RoHS: Yes; Category: Ceramic Capacitors; Stock: 7535; Pricing: 1=0.36, 10=0.251, 50=0.251, 100=0.15, 1000=0.095, 10000=0.077 (USD); RoHS Compliant: Yes
footprint Cap-0402
pins: 1, 2

## C0603C100K5RACAUTO
designator C?, comment 10pF
CAP CER 10PF 50V X7R 0603; Manufacturer: KEMET; Manufacturer Part Number: C0603C100K5RACAUTO; Item Type: Capacitor; Material: 4241ConductorMaterial; Temperature Coefficient: 30ppm/°C; Supplier: Mouser; LCSC Part Number: C2170082; RoHS: Yes; Stock: 11331; Pricing: 1=0.25, 10=0.116, 50=0.116, 100=0.07, 1000=0.061, 10000=0.047 (USD); Height: 870um; ComponentLink1URL: http://www.farnell.com/datasheets/2750555.pdf?src-supplier=Farnell; ComponentLink1Description: http://www.farnell.com/datasheets/2750555.pdf?src-supplier=Farnell; ComponentLink2URL: https://api.kemet.com/component-edge/download/datasheet/C0603C100K5RACAUTO.pdf?src-supplier=Digikey; ComponentLink2Description: https://api.kemet.com/component-edge/download/datasheet/C0603C100K5RACAUTO.pdf?src-supplier=Digikey; ComponentLink3URL: http://www.farnell.com/datasheets/2750555.pdf?src-supplier=Element14; ComponentLink3Description: http://www.farnell.com/datasheets/2750555.pdf?src-supplier=Element14; ComponentLink4URL: https://datasheet.octopart.com/C0603C100K5RACAUTO-KEMET-datasheet-86780146.pdf?src-supplier=Newark; ComponentLink4Description: https://datasheet.octopart.com/C0603C100K5RACAUTO-KEMET-datasheet-86780146.pdf?src-supplier=Newark; ComponentLink5URL: http://www.farnell.com/datasheets/2750555.pdf?src-supplier=Newark; ComponentLink5Description: http://www.farnell.com/datasheets/2750555.pdf?src-supplier=Newark; ComponentLink6URL: https://datasheet.octopart.com/C0603C100K5RACAUTO-KEMET-datasheet-140424581.pdf?src-supplier=TME; ComponentLink6Description: https://datasheet.octopart.com/C0603C100K5RACAUTO-KEMET-datasheet-140424581.pdf?src-supplier=TME
footprint Cap-0603
pins: 1, 2

## C771U472MYWDBA7317
designator C?, comment 4.7nF
CAP CER 4.7NF X1/Y2 400V/250V; Manufacturer: KEMET; Manufacturer Part Number: C771U472MYWDBA7317; Item Type: Capacitors; Supplier: Mouser; Supplier Part Number: 80-C771U472MYWDB7317; RoHS: Yes; Stock: 2909; Pricing: 1=0.96, 10=0.607, 50=0.607, 100=0.495, 1000=0.342, 10000=0.307 (USD); RoHS Compliant: Yes
footprint C771U472MYWDBA7317
pins: 1, 2

## C0805C102KDRACAUTO
designator C?, comment 1nF
CAP CER 0805 1NF 1000V X7R 10%; Manufacturer: KEMET; Manufacturer Part Number: C0805C102KDRACAUTO; Item Type: Capacitors; Dielectric Material: 4241ConductorMaterial; Voltage Rating: 1kV; Supplier: Mouser; Supplier Part Number: 80-C0805C102KDRAUTO; RoHS: Yes; Stock: 28337; Pricing: 1=0.38, 10=0.208, 50=0.208, 100=0.149, 1000=0.132, 10000=0.097 (USD); Case/Package: 0805; Min Operating Temperature: -55°C; Max Operating Temperature: 125°C; Value: 1nF; Packaging: Tape and Reel; Tolerance: 10%; Termination: SMD/SMT; Voltage Rating (DC): 1kV; RoHS Compliant: Yes; ComponentLink1URL: http://www.mouser.com/ds/2/212/KEM_C1010_X7R_HV_SMD-1102742.pdf?src-supplier=Mouser; ComponentLink1Description: http://www.mouser.com/ds/2/212/KEM_C1010_X7R_HV_SMD-1102742.pdf?src-supplier=Mouser; ComponentLink2URL: https://datasheet.octopart.com/C0805C102KDRACAUTO-KEMET-datasheet-149523722.pdf?src-supplier=Farnell; ComponentLink2Description: https://datasheet.octopart.com/C0805C102KDRACAUTO-KEMET-datasheet-149523722.pdf?src-supplier=Farnell; ComponentLink3URL: https://api.kemet.com/component-edge/download/datasheet/C0805C102KDRACAUTO.pdf?src-supplier=Digikey; ComponentLink3Description: https://api.kemet.com/component-edge/download/datasheet/C0805C102KDRACAUTO.pdf?src-supplier=Digikey; ComponentLink4URL: https://datasheet.octopart.com/C0805C102KDRACAUTO-KEMET-datasheet-112111960.pdf?src-supplier=Newark; ComponentLink4Description: https://datasheet.octopart.com/C0805C102KDRACAUTO-KEMET-datasheet-112111960.pdf?src-supplier=Newark
footprint Cap-0805 (SMD 0805)
pins: 1, 2

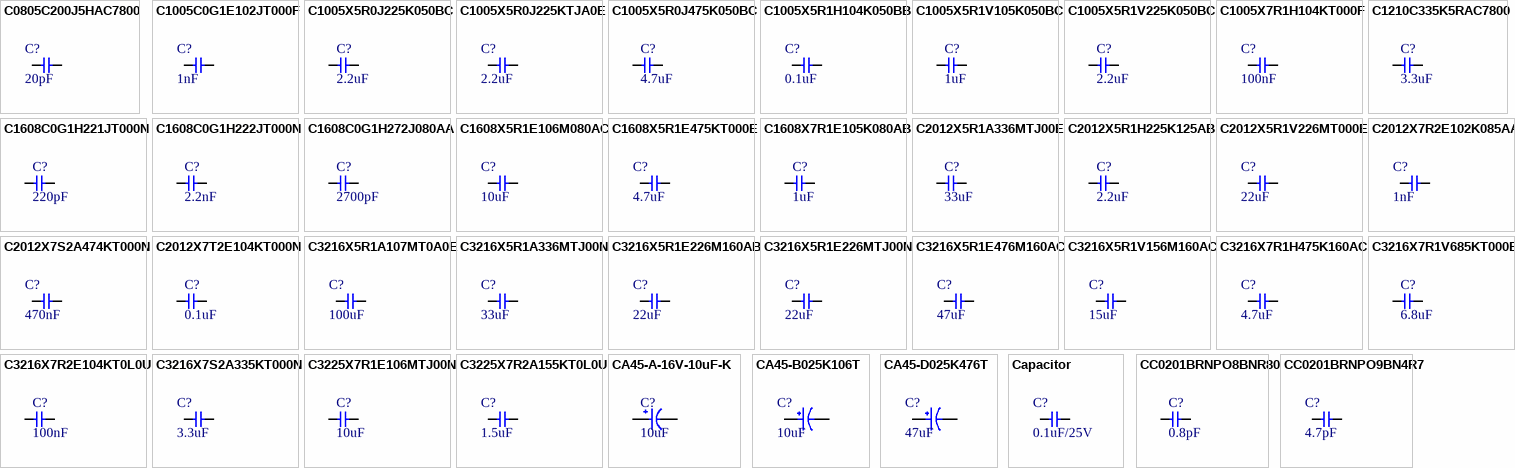
[diagram p2: symbols C0805C200J5HAC7800 to CC0201BRNPO9BN4R7]

## C0805C200J5HAC7800
designator C?, comment 20pF
Cap Cer 0805 20PF 50V Ultra Stab; Manufacturer: KEMET; Manufacturer Part Number: C0805C200J5HAC7800; Item Type: Capacitor; Supplier: Digikey; Supplier Part Number: 399-C0805C200J5HAC7800CT-ND; RoHS: Yes; Category: Ceramic Capacitors; Stock: 20467; Pricing: 1=0.1, 10=0.069, 50=0.0394, 100=0.0305, 500=0.02298, 1000=0.01805 (USD); Package: 0805
footprint Cap-0805 (SMD 0805)
pins: 1, 2

## C1005C0G1E102JT000F
designator C?, comment 1nF
CAP CER 1000PF 25V C0G 0402; Manufacturer: TDK; Manufacturer Part Number: C1005C0G1E102JT000F; Item Type: Capacitor; ComponentLink1Description: LCSC; ComponentLink1URL: https://www.lcsc.com/product-detail/Multilayer-Ceramic-Capacitors-MLCC-SMD-SMT_TDK-C1005C0G1E102JT000F_C343059.html; Package: 0402; LCSC Part Number: C343059
footprint Cap-0402
pins: 1, 2

## C1005X5R0J225K050BC
designator C?, comment 2.2uF
CAP CER 2.2UF 6.3V X5R 0402; Manufacturer: TDK; Manufacturer Part Number: C1005X5R0J225K050BC; Item Type: Capacitors; Dielectric Material: 4241ConductorMaterial; Supplier: Digikey; Supplier Part Number: 445-6847-1-ND; RoHS: Yes; Stock: 1434689; Pricing: 1=0.18, 10=0.102, 50=0.0718, 100=0.0624, 500=0.04634, 1000=0.04135, 2500=0.03605, 5000=0.03284 (USD); Pins: 2NUMBER; Material: 4241ConductorMaterial; Lead Free: 5697LeadFree; ComponentLink1URL: https://datasheet.ciiva.com/24216/c1005x5r0j225k050bc-264406-24216408.pdf?src-supplier=Mouser; ComponentLink1Description: https://datasheet.ciiva.com/24216/c1005x5r0j225k050bc-264406-24216408.pdf?src-supplier=Mouser; ComponentLink2URL: https://datasheet.ciiva.com/23802/1796654-23802728.pdf?src-supplier=Newark; ComponentLink2Description: https://datasheet.ciiva.com/23802/1796654-23802728.pdf?src-supplier=Newark; ComponentLink3URL: https://datasheet.ciiva.com/28450/1796654-28450934.pdf?src-supplier=Element14; ComponentLink3Description: https://datasheet.ciiva.com/28450/1796654-28450934.pdf?src-supplier=Element14; ComponentLink4URL: https://datasheet.ciiva.com/28665/mlcc-commercial-general-en-28665478.pdf?src-supplier=Element14; ComponentLink4Description: https://datasheet.ciiva.com/28665/mlcc-commercial-general-en-28665478.pdf?src-supplier=Element14; ComponentLink5URL: https://datasheet.ciiva.com/6291/tdkmlcccaprange-6291126.pdf?src-supplier=Digikey; ComponentLink5Description: https://datasheet.ciiva.com/6291/tdkmlcccaprange-6291126.pdf?src-supplier=Digikey; ComponentLink6URL: https://datasheet.ciiva.com/6291/tdkmlcccaprange-6291128.pdf?src-supplier=Digikey; ComponentLink6Description: https://datasheet.ciiva.com/6291/tdkmlcccaprange-6291128.pdf?src-supplier=Digikey
footprint Cap-0402
pins: 1, 2

## C1005X5R0J225KTJA0E
designator C?, comment 2.2uF
CAP CER 2.2UF 6.3V X5R 0402; Manufacturer Part Number: C1005X5R0J225KTJA0E; Manufacturer: TDK; Item Type: Capacitor; LCSC Part Number: C343036; ComponentLink1Description: LCSC; ComponentLink1URL: https://www.lcsc.com/product-detail/Multilayer-Ceramic-Capacitors-MLCC-SMD-SMT_TDK-C1005X5R0J225KTJA0E_C343036.html
footprint Cap-0402
pins: 1, 2

## C1005X5R0J475K050BC
designator C?, comment 4.7uF
CAP CER 4.7UF 6.3V X5R 0402; Manufacturer: TDK; Manufacturer Part Number: C1005X5R0J475K050BC; Item Type: Capacitors; Material: 4241ConductorMaterial; Supplier: Digikey; Supplier Part Number: 445-5947-1-ND; RoHS: Yes; Stock: 1033379; Pricing: 1=0.28, 10=0.165, 50=0.1178, 100=0.1032, 500=0.0782, 1000=0.07043, 2500=0.06217, 5000=0.05716 (USD); Dielectric Material: 4241ConductorMaterial; Lead Free: 5697LeadFree; ComponentLink1URL: https://datasheet.ciiva.com/6252/mlcc-commercial-general-en-6252115.pdf?src-supplier=Digikey; ComponentLink1Description: https://datasheet.ciiva.com/6252/mlcc-commercial-general-en-6252115.pdf?src-supplier=Digikey
footprint Cap-0402
pins: 1, 2

## C1005X5R1H104K050BB
designator C?, comment 0.1uF
CAP CER 0.1UF 50V X5R 0402; Manufacturer: TDK; Manufacturer Part Number: C1005X5R1H104K050BB; Dielectric Material: Ceramic; Capacitance: 100nF; Tolerance: 10%; Item Type: Capacitor; Supplier 1: Digi-Key; Stock 1: 1455182; Pricing 1: 1=0.12, 10=0.09, 50=0.049, 100=0.04, 500=0.02858, 1000=0.02245, 2500=0.02041, 5000=0.01878 (USD); Mount: Surface Mount; Case/Package: 0402; Case Code (Metric): 1005; Case Code (Imperial): 0402; Weight: 2.3E-05oz; Min Operating Temperature: -55°C; Max Operating Temperature: 85°C; Dielectric: X5R; Voltage Rating: 50V; Packaging: Tape and Reel; Voltage Rating (DC): 50V; Termination: SMD/SMT; Construction: Flat; Package Quantity: 1; Resistor Type: Ceramic; Voltage: 50V; Series: C; Length: 1mm; Width: 0.02inch; Height: 0.5mm; Depth: 0.5mm; Thickness: 0.022inch; Radiation Hardening: No; Lead Free: Lead Free; REACH SVHC: No SVHC; RoHS Compliant: Yes; ComponentLink1URL: https://product.tdk.com/info/en/catalog/spec/mlccspec_commercial_general_midvoltage_en.pdf?src-supplier=Digi-Key; ComponentLink1Description: https://product.tdk.com/info/en/catalog/spec/mlccspec_commercial_general_midvoltage_en.pdf?src-supplier=Digi-Key; ComponentLink2URL: http://www.tdk.co.jp/tefe02/e413_c.pdf?src-supplier=Future+Electronics; ComponentLink2Description: http://www.tdk.co.jp/tefe02/e413_c.pdf?src-supplier=Future+Electronics; ComponentLink3URL: https://www.verical.com/server-webapp/html/getDatasheet?partID=743571&src-supplier=Verical; ComponentLink3Description: https://www.verical.com/server-webapp/html/getDatasheet?partID=743571&src-supplier=Verical; ComponentLink4URL: http://www.tdk.co.jp/tefe02/e412_c.pdf?src-supplier=Avnet+Europe; ComponentLink4Description: http://www.tdk.co.jp/tefe02/e412_c.pdf?src-supplier=Avnet+Europe; Supplier Part Number 1: 445-5942-1-ND; LCSC Part Number: C2181865
footprint Cap-0402
pins: 1, 2

## C1005X5R1V105K050BC
designator C?, comment 1uF
CAP CER 1UF 35V X5R 0402; Manufacturer: TDK; Manufacturer Part Number: C1005X5R1V105K050BC; Item Type: Capacitors; Dielectric Material: Ceramic; Material: 4241ConductorMaterial; Tolerance: 10%; Supplier: Digikey; Supplier Part Number: 445-9073-1-ND; RoHS: Yes; Stock: 682645; Pricing: 1=0.15, 10=0.087, 50=0.061, 100=0.0528, 500=0.03898, 1000=0.03468, 2500=0.03011, 5000=0.02735 (USD); Mounting Technology: Surface Mount; Case/Package: 0402; Case Code (Metric): 1005; Case Code (Imperial): 0402; Min Operating Temperature: -55°C; Max Operating Temperature: 85°C; Value: 1uF; Voltage Rating: 35V; Packaging: Tape and Reel; Dielectric: X5R; Series: C; Length: 1mm; Depth: 0.5mm; Radiation Hardening: No; Reach SVHC Compliant: No; Lead Free: Lead Free; RoHS Compliant: Yes; ComponentLink1URL: https://datasheet.ciiva.com/26834/getdatasheetpartid-750449-26834298.pdf?src-supplier=Verical; ComponentLink1Description: https://datasheet.ciiva.com/26834/getdatasheetpartid-750449-26834298.pdf?src-supplier=Verical; ComponentLink2URL: https://datasheet.ciiva.com/28451/1796654-28451087.pdf?src-supplier=Element14; ComponentLink2Description: https://datasheet.ciiva.com/28451/1796654-28451087.pdf?src-supplier=Element14; ComponentLink3URL: https://datasheet.ciiva.com/22719/1796654-22719533.pdf?src-supplier=Element14; ComponentLink3Description: https://datasheet.ciiva.com/22719/1796654-22719533.pdf?src-supplier=Element14
footprint Cap-0402
pins: 1, 2

## C1005X5R1V225K050BC
designator C?, comment 2.2uF
CAP CER 2.2UF 35V X5R 0402; Manufacturer: TDK; Manufacturer Part Number: C1005X5R1V225K050BC; Item Type: Capacitors; Dielectric Material: Ceramic; Material: 4241ConductorMaterial; Tolerance: 10%; Supplier: Digikey; Supplier Part Number: 445-9028-1-ND; RoHS: Yes; Stock: 1458755; Pricing: 1=0.21, 10=0.123, 50=0.0866, 100=0.0754, 500=0.05646, 1000=0.05055, 2500=0.04429, 5000=0.04049 (USD); Mounting Technology: Surface Mount; Case/Package: 0402; Case Code (Imperial): 0402; Case Code (Metric): 1005; Weight: 2.3E-05oz; Min Operating Temperature: -55°C; Max Operating Temperature: 85°C; Packaging: Tape and Reel; Voltage Rating: 35V; Value: 2.2uF; Voltage Rating (DC): 35V; Package Quantity: 1; Dielectric: X5R; Termination: SMD/SMT; Series: C; Length: 1mm; Width: 0.02inch; Height: 0.5mm; Thickness: 0.022inch; Depth: 0.5mm; Lead Free: Lead Free; RoHS Compliant: Yes; Reach SVHC Compliant: Unknown; ComponentLink1URL: https://datasheet.ciiva.com/24218/mlcc-commercial-general-en-24218938.pdf?src-supplier=Mouser; ComponentLink1Description: https://datasheet.ciiva.com/24218/mlcc-commercial-general-en-24218938.pdf?src-supplier=Mouser
footprint Cap-0402
pins: 1, 2

## C1005X7R1H104KT000F
designator C?, comment 100nF
CAP CER 0.1UF 50V X7R 0402; Manufacturer: TDK; Manufacturer Part Number: C1005X7R1H104KT000F; Tolerance: 10%; Voltage: 25V; Item Type: Capacitor; Supplier 1: Avnet; RoHS: No; Category: Ceramic Capacitors; Dielectric: X7R; Supplier Part Number 1: C1005X7R1H104KT000F; LCSC Part Number: C361198; ComponentLink1Description: LCSC; ComponentLink1URL: https://www.lcsc.com/product-detail/Multilayer-Ceramic-Capacitors-MLCC-SMD-SMT_TDK-C1005X7R1H104KT000F_C361198.html
footprint cap-0402
pins: 1, 2

## C1210C335K5RAC7800
designator C?, comment 3.3uF
CAP CER 3.3UF 50V X7R 1210; Manufacturer: KEMET; Manufacturer Part Number: C1210C335K5RAC7800; Item Type: Capacitor; Package: 1210
footprint Cap-1210 (SMD 1210)
pins: 1, 2

## C1608C0G1H221JT000N
designator C?, comment 220pF
CAP CER 220PF 50V C0G 0603; Manufacturer: TDK Corporation; Manufacturer Part Number: C1608C0G1H221J080AA; Item Type: Capacitors; Package: 0603; LCSC Part Number: C695131; ComponentLink1Description: LCSC; ComponentLink1URL: https://www.lcsc.com/product-detail/Multilayer-Ceramic-Capacitors-MLCC-SMD-SMT_TDK-C1608C0G1H221JT000N_C695131.html
footprint Cap-0603
pins: 1, 2

## C1608C0G1H222JT000N
designator C?, comment 2.2nF
CAP CER 2200PF 50V C0G 0603; Manufacturer: TDK Corporation; Manufacturer Part Number: C1608C0G1H222J080AA; Item Type: Capacitor; Package: 0603; LCSC Part Number: C76601; ComponentLink1Description: LCSC; ComponentLink1URL: https://www.lcsc.com/product-detail/Multilayer-Ceramic-Capacitors-MLCC-SMD-SMT_TDK-C1608C0G1H222JT000N_C76601.html
footprint Cap-0603
pins: 1, 2

## C1608C0G1H272J080AA
designator C?, comment 2700pF
CAP CER 2700PF 50V C0G 0603; Manufacturer: TDK; Manufacturer Part Number: C1608C0G1H272J080AA; Item Type: Capacitors; Dielectric Material: Ceramic; Value: 2.7nF; Tolerance: 5%; Supplier: Digikey; Supplier Part Number: 445-2669-1-ND; RoHS: Yes; Stock: 2978; Pricing: 1=0.16, 10=0.091, 50=0.0638, 100=0.0554, 500=0.04098, 1000=0.03649 (USD); Mounting Technology: Surface Mount; Case/Package: 0603; Case Code (Metric): 1608; Case Code (Imperial): 0603; Weight: 7.1E-05oz; Min Operating Temperature: -55°C; Max Operating Temperature: 125°C; Voltage Rating: 50V; Packaging: Tape and Reel; Package Quantity: 4000; Voltage Rating (DC): 50V; Dielectric: C0G; Termination: SMD/SMT; Series: C; Construction: Flat; Length: 1.6mm; Width: 0.8mm; Height: 0.8mm; Depth: 0.8mm; Reach SVHC Compliant: No; Lead Free: Lead Free; RoHS Compliant: Yes; ComponentLink1URL: https://datasheet.ciiva.com/24221/c1608c0g1h272j080aa-264507-24221179.pdf?src-supplier=Mouser; ComponentLink1Description: https://datasheet.ciiva.com/24221/c1608c0g1h272j080aa-264507-24221179.pdf?src-supplier=Mouser; ComponentLink2URL: https://datasheet.ciiva.com/6291/tdkmlcccaprange-6291545.pdf?src-supplier=Digikey; ComponentLink2Description: https://datasheet.ciiva.com/6291/tdkmlcccaprange-6291545.pdf?src-supplier=Digikey; ComponentLink3URL: https://datasheet.ciiva.com/6291/tdkmlcccaprange-6291541.pdf?src-supplier=Digikey; ComponentLink3Description: https://datasheet.ciiva.com/6291/tdkmlcccaprange-6291541.pdf?src-supplier=Digikey; ComponentLink4URL: https://datasheet.ciiva.com/6291/tdkmlcccaprange-6291550.pdf?src-supplier=Digikey; ComponentLink4Description: https://datasheet.ciiva.com/6291/tdkmlcccaprange-6291550.pdf?src-supplier=Digikey; ComponentLink5URL: https://datasheet.ciiva.com/28576/1744655-28576939.pdf?src-supplier=Element14; ComponentLink5Description: https://datasheet.ciiva.com/28576/1744655-28576939.pdf?src-supplier=Element14
footprint Cap-0603
pins: 1, 2